# Altium integrated library 1437566-4.IntLib: 1 symbol
Pins are listed as number, name and electrical type; pins without a type are passive.

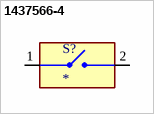
[diagram p0: symbol 1437566-4]

## 1437566-4
designator S?
FSMSMTR=TACT SWITCH SPST-NO; Contact_Current_Rating: 50 mA; Configuration_Pole-Throw: Single Pole - Single Throw; MF: TE Connectivity; MP: 1437566-4; SnapEDA_Link: https://www.snapeda.com/parts/1437566-4/TE+Connectivity+Alcoswitch+Switches/view-part/?ref=snap; Package: None; Value: *; Check_prices: https://www.snapeda.com/parts/1437566-4/TE+Connectivity+Alcoswitch+Switches/view-part/?ref=eda
footprint SW_1437566-4
pins: 1, 2